# Altium footprint library Package_DFN_QFN.PcbLib: 735 footprints (part 23 of 46)
Each footprint in its own frame and in the unit in brackets; x right, y up, seen from the top. Pads: shape width x height; smd on the part's side, far side on the other; paste and mask are expansions set on the pad; w line width, h text height; cw(c..) or ccw(c..) is an arc to the next point about the centre after c.
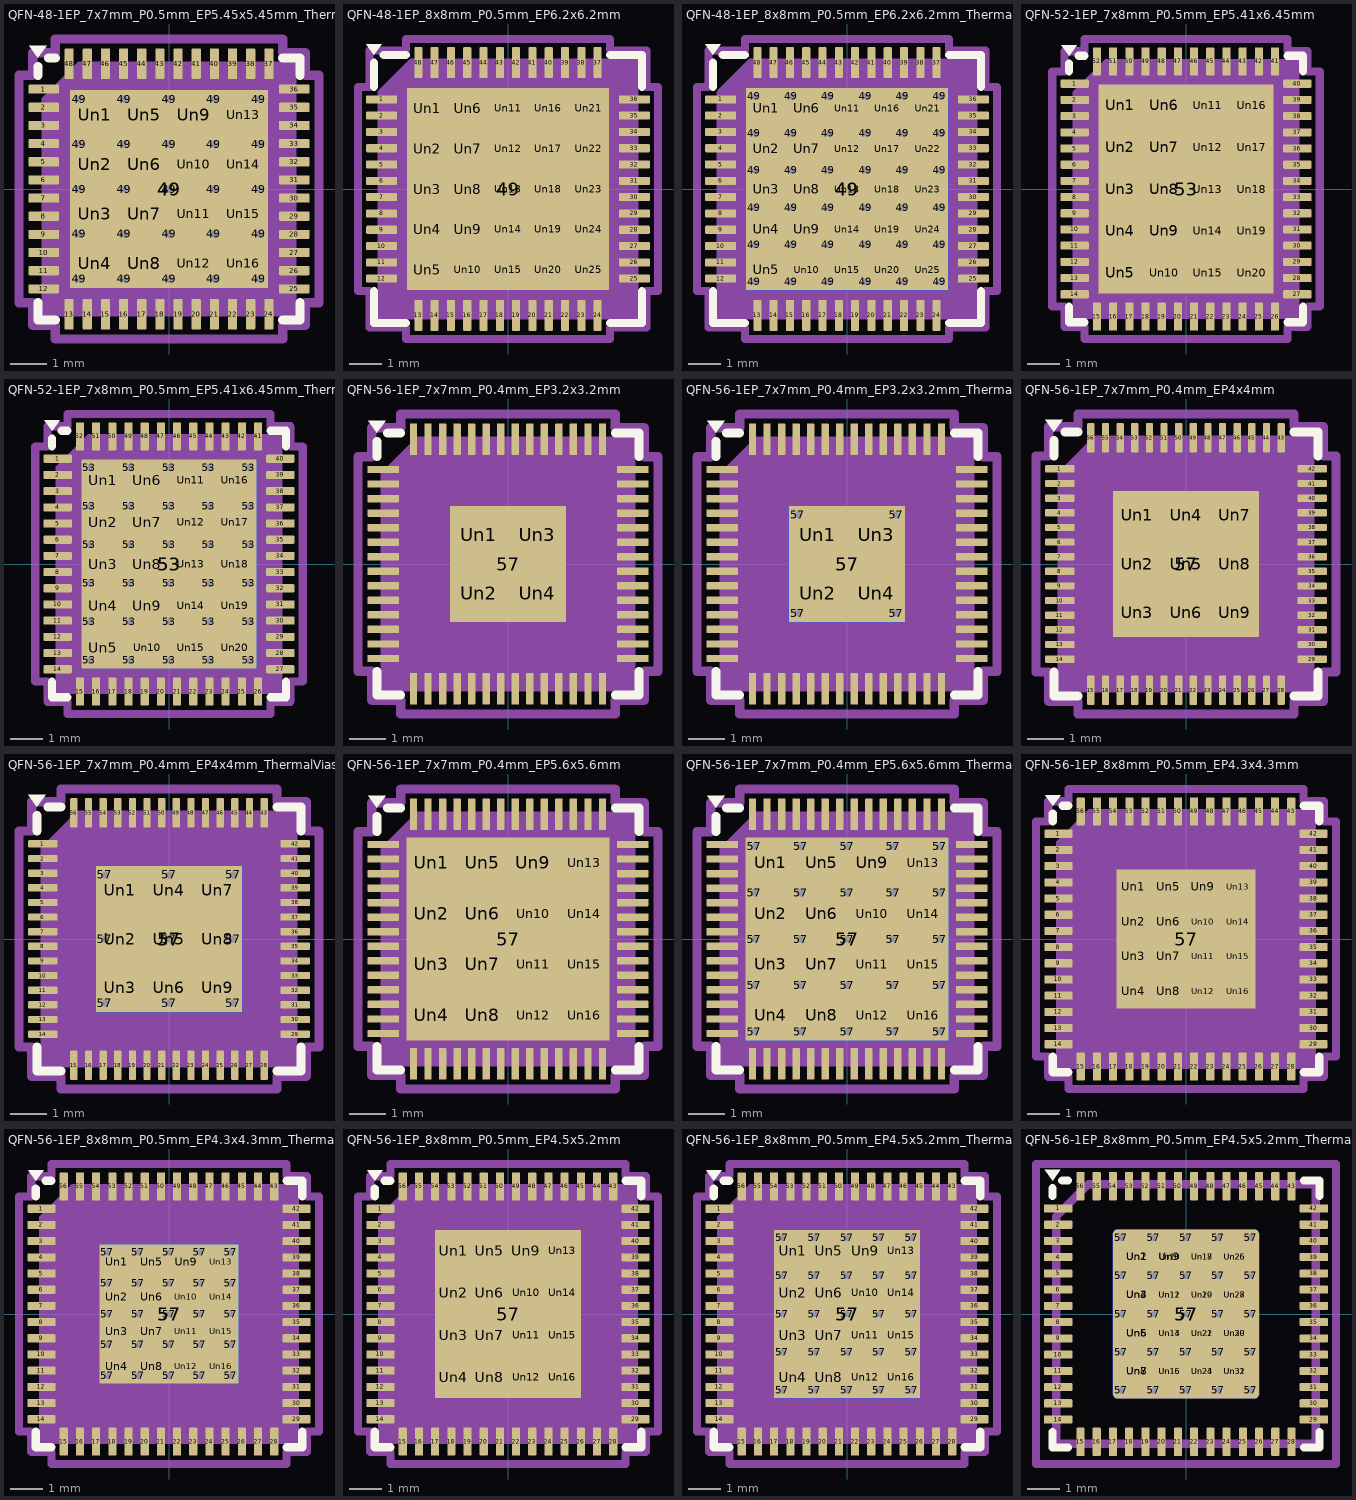
[diagram p22: the footprints below, top view; thin cyan lines are the x and y axes]

## QFN-48-1EP_7x7mm_P0.5mm_EP5.45x5.45mm_ThermalVias [mm] "QFN-48-1EP_7x7mm_P0.5mm_EP5.45x5.45mm_ThermalVias"
pads (91):
  rrect25% 0.85x0.25 smd: 1(-3.45,2.75) 2(-3.45,2.25) 3(-3.45,1.75) 4(-3.45,1.25) 5(-3.45,0.75) 6(-3.45,0.25) 7(-3.45,-0.25) 8(-3.45,-0.75) 9(-3.45,-1.25) 10(-3.45,-1.75) 11(-3.45,-2.25) 12(-3.45,-2.75) 25(3.45,-2.75) 26(3.45,-2.25) 27(3.45,-1.75) 28(3.45,-1.25) 29(3.45,-0.75) 30(3.45,-0.25) 31(3.45,0.25) 32(3.45,0.75) 33(3.45,1.25) 34(3.45,1.75) 35(3.45,2.25) 36(3.45,2.75)
  rrect25% 0.25x0.85 smd: 13(-2.75,-3.45) 14(-2.25,-3.45) 15(-1.75,-3.45) 16(-1.25,-3.45) 17(-0.75,-3.45) 18(-0.25,-3.45) 19(0.25,-3.45) 20(0.75,-3.45) 21(1.25,-3.45) 22(1.75,-3.45) 23(2.25,-3.45) 24(2.75,-3.45) 37(2.75,3.45) 38(2.25,3.45) 39(1.75,3.45) 40(1.25,3.45) 41(0.75,3.45) 42(0.25,3.45) 43(-0.25,3.45) 44(-0.75,3.45) 45(-1.25,3.45) 46(-1.75,3.45) 47(-2.25,3.45) 48(-2.75,3.45)
  round 0.5 hole 0.2: 49(-2.475,-2.475) 49(-2.475,-1.238) 49(-2.475,0) 49(-2.475,1.238) 49(-2.475,2.475) 49(-1.238,-2.475) 49(-1.238,-1.238) 49(-1.238,0) 49(-1.238,1.238) 49(-1.238,2.475) 49(0,-2.475) 49(0,-1.238) 49(0,0) 49(0,1.238) 49(0,2.475) 49(1.238,-2.475) 49(1.238,-1.238) 49(1.238,0) 49(1.238,1.238) 49(1.238,2.475) 49(2.475,-2.475) 49(2.475,-1.238) 49(2.475,0) 49(2.475,1.238) 49(2.475,2.475)
  rect 5.45x5.45 smd: 49(0,0)
  rect 5.45x5.45 smd far side: 49(0,0)
  rrect23% 1.1x1.1 on Top Paste: Un1(-2.04,2.04) Un2(-2.04,0.68) Un3(-2.04,-0.68) Un4(-2.04,-2.04) Un5(-0.68,2.04) Un6(-0.68,0.68) Un7(-0.68,-0.68) Un8(-0.68,-2.04) Un9(0.68,2.04) Un10(0.68,0.68) Un11(0.68,-0.68) Un12(0.68,-2.04) Un13(2.04,2.04) Un14(2.04,0.68) Un15(2.04,-0.68) Un16(2.04,-2.04)
F.SilkS:
  region: -3.61,3.61 -3.85,3.94 -3.37,3.94
  lines w0.254: -3.61,-3.135 -3.61,-3.61 -3.135,-3.61 ; -3.61,3.135 -3.61,3.37 ; -3.31,3.61 -3.135,3.61 ; 3.135,-3.61 3.61,-3.61 3.61,-3.135 ; 3.135,3.61 3.61,3.61 3.61,3.135
Top Component Center:
  lines w0.127: -0.127,0 0.127,0 -0.127,0 ; 0,-0.127 0,0.127 0,-0.127
Top Assembly:
  region: 3.5,-3.5 -3.5,-3.5 -3.5,2.5 -2.5,3.5 3.5,3.5
Top Courtyard:
  lines w0.254: -4.13,-3.13 -4.13,3.13 -3.75,3.13 -3.75,3.75 -3.13,3.75 -3.13,4.13 3.13,4.13 3.13,3.75 3.75,3.75 3.75,3.13 4.13,3.13 4.13,-3.13 3.75,-3.13 3.75,-3.75 3.13,-3.75 3.13,-4.13 -3.13,-4.13 -3.13,-3.75 -3.75,-3.75 -3.75,-3.13 -4.13,-3.13
Top Designator:
  text ".Designator" at -3.43,-0.344 h1.52
3D body "QFN-48-1EP_7x7mm_P0.5mm_EP5.15x5.15mm.step": height 0.77, standoff 0, extent -3.5,-3.5 3.5,3.5

## QFN-48-1EP_8x8mm_P0.5mm_EP6.2x6.2mm [mm] "QFN-48-1EP_8x8mm_P0.5mm_EP6.2x6.2mm"
pads (74):
  rrect25% 0.95x0.25 smd: 1(-3.875,2.75) 2(-3.875,2.25) 3(-3.875,1.75) 4(-3.875,1.25) 5(-3.875,0.75) 6(-3.875,0.25) 7(-3.875,-0.25) 8(-3.875,-0.75) 9(-3.875,-1.25) 10(-3.875,-1.75) 11(-3.875,-2.25) 12(-3.875,-2.75) 25(3.875,-2.75) 26(3.875,-2.25) 27(3.875,-1.75) 28(3.875,-1.25) 29(3.875,-0.75) 30(3.875,-0.25) 31(3.875,0.25) 32(3.875,0.75) 33(3.875,1.25) 34(3.875,1.75) 35(3.875,2.25) 36(3.875,2.75)
  rrect25% 0.25x0.95 smd: 13(-2.75,-3.875) 14(-2.25,-3.875) 15(-1.75,-3.875) 16(-1.25,-3.875) 17(-0.75,-3.875) 18(-0.25,-3.875) 19(0.25,-3.875) 20(0.75,-3.875) 21(1.25,-3.875) 22(1.75,-3.875) 23(2.25,-3.875) 24(2.75,-3.875) 37(2.75,3.875) 38(2.25,3.875) 39(1.75,3.875) 40(1.25,3.875) 41(0.75,3.875) 42(0.25,3.875) 43(-0.25,3.875) 44(-0.75,3.875) 45(-1.25,3.875) 46(-1.75,3.875) 47(-2.25,3.875) 48(-2.75,3.875)
  rect 6.2x6.2 smd: 49(0,0)
  rrect25% 1x1 on Top Paste: Un1(-2.48,2.48) Un2(-2.48,1.24) Un3(-2.48,0) Un4(-2.48,-1.24) Un5(-2.48,-2.48) Un6(-1.24,2.48) Un7(-1.24,1.24) Un8(-1.24,0) Un9(-1.24,-1.24) Un10(-1.24,-2.48) Un11(0,2.48) Un12(0,1.24) Un13(0,0) Un14(0,-1.24) Un15(0,-2.48) Un16(1.24,2.48) Un17(1.24,1.24) Un18(1.24,0) Un19(1.24,-1.24) Un20(1.24,-2.48) Un21(2.48,2.48) Un22(2.48,1.24) Un23(2.48,0) Un24(2.48,-1.24) Un25(2.48,-2.48)
F.SilkS:
  region: -4.11,4.11 -4.35,4.44 -3.87,4.44
  lines w0.254: -4.11,-3.135 -4.11,-4.11 -3.135,-4.11 ; -4.11,3.135 -4.11,3.87 ; -3.81,4.11 -3.135,4.11 ; 3.135,-4.11 4.11,-4.11 4.11,-3.135 ; 3.135,4.11 4.11,4.11 4.11,3.135
Top Component Center:
  lines w0.127: -0.127,0 0.127,0 -0.127,0 ; 0,-0.127 0,0.127 0,-0.127
Top Assembly:
  region: 4,-4 -4,-4 -4,3 -3,4 4,4
Top Courtyard:
  lines w0.254: -4.6,-3.13 -4.6,3.13 -4.25,3.13 -4.25,4.25 -3.13,4.25 -3.13,4.6 3.13,4.6 3.13,4.25 4.25,4.25 4.25,3.13 4.6,3.13 4.6,-3.13 4.25,-3.13 4.25,-4.25 3.13,-4.25 3.13,-4.6 -3.13,-4.6 -3.13,-4.25 -4.25,-4.25 -4.25,-3.13 -4.6,-3.13
Top Designator:
  text ".Designator" at -3.43,-0.344 h1.52

## QFN-48-1EP_8x8mm_P0.5mm_EP6.2x6.2mm_ThermalVias [mm] "QFN-48-1EP_8x8mm_P0.5mm_EP6.2x6.2mm_ThermalVias"
pads (111):
  rrect25% 0.95x0.25 smd: 1(-3.875,2.75) 2(-3.875,2.25) 3(-3.875,1.75) 4(-3.875,1.25) 5(-3.875,0.75) 6(-3.875,0.25) 7(-3.875,-0.25) 8(-3.875,-0.75) 9(-3.875,-1.25) 10(-3.875,-1.75) 11(-3.875,-2.25) 12(-3.875,-2.75) 25(3.875,-2.75) 26(3.875,-2.25) 27(3.875,-1.75) 28(3.875,-1.25) 29(3.875,-0.75) 30(3.875,-0.25) 31(3.875,0.25) 32(3.875,0.75) 33(3.875,1.25) 34(3.875,1.75) 35(3.875,2.25) 36(3.875,2.75)
  rrect25% 0.25x0.95 smd: 13(-2.75,-3.875) 14(-2.25,-3.875) 15(-1.75,-3.875) 16(-1.25,-3.875) 17(-0.75,-3.875) 18(-0.25,-3.875) 19(0.25,-3.875) 20(0.75,-3.875) 21(1.25,-3.875) 22(1.75,-3.875) 23(2.25,-3.875) 24(2.75,-3.875) 37(2.75,3.875) 38(2.25,3.875) 39(1.75,3.875) 40(1.25,3.875) 41(0.75,3.875) 42(0.25,3.875) 43(-0.25,3.875) 44(-0.75,3.875) 45(-1.25,3.875) 46(-1.75,3.875) 47(-2.25,3.875) 48(-2.75,3.875)
  round 0.5 hole 0.2: 49(-2.85,-2.85) 49(-2.85,-1.71) 49(-2.85,-0.57) 49(-2.85,0.57) 49(-2.85,1.71) 49(-2.85,2.85) 49(-1.71,-2.85) 49(-1.71,-1.71) 49(-1.71,-0.57) 49(-1.71,0.57) 49(-1.71,1.71) 49(-1.71,2.85) 49(-0.57,-2.85) 49(-0.57,-1.71) 49(-0.57,-0.57) 49(-0.57,0.57) 49(-0.57,1.71) 49(-0.57,2.85) 49(0.57,-2.85) 49(0.57,-1.71) 49(0.57,-0.57) 49(0.57,0.57) 49(0.57,1.71) 49(0.57,2.85) 49(1.71,-2.85) 49(1.71,-1.71) 49(1.71,-0.57) 49(1.71,0.57) 49(1.71,1.71) 49(1.71,2.85) 49(2.85,-2.85) 49(2.85,-1.71) 49(2.85,-0.57) 49(2.85,0.57) 49(2.85,1.71) 49(2.85,2.85)
  rect 6.2x6.2 smd: 49(0,0)
  rect 6.2x6.2 smd far side: 49(0,0)
  rrect25% 0.96x0.96 on Top Paste: Un1(-2.48,2.48) Un2(-2.48,1.24) Un3(-2.48,0) Un4(-2.48,-1.24) Un5(-2.48,-2.48) Un6(-1.24,2.48) Un7(-1.24,1.24) Un8(-1.24,0) Un9(-1.24,-1.24) Un10(-1.24,-2.48) Un11(0,2.48) Un12(0,1.24) Un13(0,0) Un14(0,-1.24) Un15(0,-2.48) Un16(1.24,2.48) Un17(1.24,1.24) Un18(1.24,0) Un19(1.24,-1.24) Un20(1.24,-2.48) Un21(2.48,2.48) Un22(2.48,1.24) Un23(2.48,0) Un24(2.48,-1.24) Un25(2.48,-2.48)
F.SilkS:
  region: -4.11,4.11 -4.35,4.44 -3.87,4.44
  lines w0.254: -4.11,-3.135 -4.11,-4.11 -3.135,-4.11 ; -4.11,3.135 -4.11,3.87 ; -3.81,4.11 -3.135,4.11 ; 3.135,-4.11 4.11,-4.11 4.11,-3.135 ; 3.135,4.11 4.11,4.11 4.11,3.135
Top Component Center:
  lines w0.127: -0.127,0 0.127,0 -0.127,0 ; 0,-0.127 0,0.127 0,-0.127
Top Assembly:
  region: 4,-4 -4,-4 -4,3 -3,4 4,4
Top Courtyard:
  lines w0.254: -4.6,-3.13 -4.25,-3.13 -4.25,-4.25 -3.13,-4.25 -3.13,-4.6 3.13,-4.6 3.13,-4.25 4.25,-4.25 4.25,-3.13 4.6,-3.13 4.6,3.13 4.25,3.13 4.25,4.25 3.13,4.25 3.13,4.6 -3.13,4.6 -3.13,4.25 -4.25,4.25 -4.25,3.13 -4.6,3.13 -4.6,-3.13
Top Designator:
  text ".Designator" at -3.43,-0.344 h1.52

## QFN-52-1EP_7x8mm_P0.5mm_EP5.41x6.45mm [mm] "QFN-52-1EP_7x8mm_P0.5mm_EP5.41x6.45mm"
pads (73):
  rrect25% 0.875x0.25 smd: 1(-3.437,3.25) 2(-3.437,2.75) 3(-3.437,2.25) 4(-3.437,1.75) 5(-3.437,1.25) 6(-3.437,0.75) 7(-3.437,0.25) 8(-3.437,-0.25) 9(-3.437,-0.75) 10(-3.437,-1.25) 11(-3.437,-1.75) 12(-3.437,-2.25) 13(-3.437,-2.75) 14(-3.437,-3.25) 27(3.437,-3.25) 28(3.437,-2.75) 29(3.437,-2.25) 30(3.437,-1.75) 31(3.437,-1.25) 32(3.437,-0.75) 33(3.437,-0.25) 34(3.437,0.25) 35(3.437,0.75) 36(3.437,1.25) 37(3.437,1.75) 38(3.437,2.25) 39(3.437,2.75) 40(3.437,3.25)
  rrect25% 0.25x0.875 smd: 15(-2.75,-3.938) 16(-2.25,-3.938) 17(-1.75,-3.938) 18(-1.25,-3.938) 19(-0.75,-3.938) 20(-0.25,-3.938) 21(0.25,-3.938) 22(0.75,-3.938) 23(1.25,-3.938) 24(1.75,-3.938) 25(2.25,-3.938) 26(2.75,-3.938) 41(2.75,3.938) 42(2.25,3.938) 43(1.75,3.938) 44(1.25,3.938) 45(0.75,3.938) 46(0.25,3.938) 47(-0.25,3.938) 48(-0.75,3.938) 49(-1.25,3.938) 50(-1.75,3.938) 51(-2.25,3.938) 52(-2.75,3.938)
  rect 5.41x6.45 smd: 53(0,0)
  rrect24% 1.09x1.04 on Top Paste: Un1(-2.025,2.58) Un2(-2.025,1.29) Un3(-2.025,0) Un4(-2.025,-1.29) Un5(-2.025,-2.58) Un6(-0.675,2.58) Un7(-0.675,1.29) Un8(-0.675,0) Un9(-0.675,-1.29) Un10(-0.675,-2.58) Un11(0.675,2.58) Un12(0.675,1.29) Un13(0.675,0) Un14(0.675,-1.29) Un15(0.675,-2.58) Un16(2.025,2.58) Un17(2.025,1.29) Un18(2.025,0) Un19(2.025,-1.29) Un20(2.025,-2.58)
F.SilkS:
  region: -3.61,4.11 -3.85,4.44 -3.37,4.44
  lines w0.254: -3.61,-3.635 -3.61,-4.11 -3.135,-4.11 ; -3.61,3.635 -3.61,3.87 ; -3.31,4.11 -3.135,4.11 ; 3.135,-4.11 3.61,-4.11 3.61,-3.635 ; 3.135,4.11 3.61,4.11 3.61,3.635
Top Component Center:
  lines w0.127: -0.127,0 0.127,0 -0.127,0 ; 0,-0.127 0,0.127 0,-0.127
Top Assembly:
  region: 3.5,-4 -3.5,-4 -3.5,3 -2.5,4 3.5,4
Top Courtyard:
  lines w0.254: -4.13,-3.63 -3.75,-3.63 -3.75,-4.25 -3.13,-4.25 -3.13,-4.63 3.13,-4.63 3.13,-4.25 3.75,-4.25 3.75,-3.63 4.13,-3.63 4.13,3.63 3.75,3.63 3.75,4.25 3.13,4.25 3.13,4.63 -3.13,4.63 -3.13,4.25 -3.75,4.25 -3.75,3.63 -4.13,3.63 -4.13,-3.63
Top Designator:
  text ".Designator" at -3.43,-0.344 h1.52
3D body "QFN-52-1EP_7x8mm_P0.5mm_EP5.41x6.45mm.step": height 0.77, standoff 0, extent -3.5,-4 3.5,4

## QFN-52-1EP_7x8mm_P0.5mm_EP5.41x6.45mm_ThermalVias [mm] "QFN-52-1EP_7x8mm_P0.5mm_EP5.41x6.45mm_ThermalVias"
pads (104):
  rrect25% 0.875x0.25 smd: 1(-3.437,3.25) 2(-3.437,2.75) 3(-3.437,2.25) 4(-3.437,1.75) 5(-3.437,1.25) 6(-3.437,0.75) 7(-3.437,0.25) 8(-3.437,-0.25) 9(-3.437,-0.75) 10(-3.437,-1.25) 11(-3.437,-1.75) 12(-3.437,-2.25) 13(-3.437,-2.75) 14(-3.437,-3.25) 27(3.437,-3.25) 28(3.437,-2.75) 29(3.437,-2.25) 30(3.437,-1.75) 31(3.437,-1.25) 32(3.437,-0.75) 33(3.437,-0.25) 34(3.437,0.25) 35(3.437,0.75) 36(3.437,1.25) 37(3.437,1.75) 38(3.437,2.25) 39(3.437,2.75) 40(3.437,3.25)
  rrect25% 0.25x0.875 smd: 15(-2.75,-3.938) 16(-2.25,-3.938) 17(-1.75,-3.938) 18(-1.25,-3.938) 19(-0.75,-3.938) 20(-0.25,-3.938) 21(0.25,-3.938) 22(0.75,-3.938) 23(1.25,-3.938) 24(1.75,-3.938) 25(2.25,-3.938) 26(2.75,-3.938) 41(2.75,3.938) 42(2.25,3.938) 43(1.75,3.938) 44(1.25,3.938) 45(0.75,3.938) 46(0.25,3.938) 47(-0.25,3.938) 48(-0.75,3.938) 49(-1.25,3.938) 50(-1.75,3.938) 51(-2.25,3.938) 52(-2.75,3.938)
  round 0.5 hole 0.2: 53(-2.455,-2.975) 53(-2.455,-1.785) 53(-2.455,-0.595) 53(-2.455,0.595) 53(-2.455,1.785) 53(-2.455,2.975) 53(-1.228,-2.975) 53(-1.228,-1.785) 53(-1.228,-0.595) 53(-1.228,0.595) 53(-1.228,1.785) 53(-1.228,2.975) 53(0,-2.975) 53(0,-1.785) 53(0,-0.595) 53(0,0.595) 53(0,1.785) 53(0,2.975) 53(1.228,-2.975) 53(1.228,-1.785) 53(1.228,-0.595) 53(1.228,0.595) 53(1.228,1.785) 53(1.228,2.975) 53(2.455,-2.975) 53(2.455,-1.785) 53(2.455,-0.595) 53(2.455,0.595) 53(2.455,1.785) 53(2.455,2.975)
  rect 5.41x6.45 smd: 53(0,0)
  rect 5.41x6.45 smd far side: 53(0,0)
  rrect25% 1.05x1 on Top Paste: Un1(-2.025,2.58) Un2(-2.025,1.29) Un3(-2.025,0) Un4(-2.025,-1.29) Un5(-2.025,-2.58) Un6(-0.675,2.58) Un7(-0.675,1.29) Un8(-0.675,0) Un9(-0.675,-1.29) Un10(-0.675,-2.58) Un11(0.675,2.58) Un12(0.675,1.29) Un13(0.675,0) Un14(0.675,-1.29) Un15(0.675,-2.58) Un16(2.025,2.58) Un17(2.025,1.29) Un18(2.025,0) Un19(2.025,-1.29) Un20(2.025,-2.58)
F.SilkS:
  region: -3.61,4.11 -3.85,4.44 -3.37,4.44
  lines w0.254: -3.61,-3.635 -3.61,-4.11 -3.135,-4.11 ; -3.61,3.635 -3.61,3.87 ; -3.31,4.11 -3.135,4.11 ; 3.135,-4.11 3.61,-4.11 3.61,-3.635 ; 3.135,4.11 3.61,4.11 3.61,3.635
Top Component Center:
  lines w0.127: -0.127,0 0.127,0 -0.127,0 ; 0,-0.127 0,0.127 0,-0.127
Top Assembly:
  region: 3.5,-4 -3.5,-4 -3.5,3 -2.5,4 3.5,4
Top Courtyard:
  lines w0.254: -4.13,-3.63 -3.75,-3.63 -3.75,-4.25 -3.13,-4.25 -3.13,-4.63 3.13,-4.63 3.13,-4.25 3.75,-4.25 3.75,-3.63 4.13,-3.63 4.13,3.63 3.75,3.63 3.75,4.25 3.13,4.25 3.13,4.63 -3.13,4.63 -3.13,4.25 -3.75,4.25 -3.75,3.63 -4.13,3.63 -4.13,-3.63
Top Designator:
  text ".Designator" at -3.43,-0.344 h1.52
3D body "QFN-52-1EP_7x8mm_P0.5mm_EP5.41x6.45mm.step": height 0.77, standoff 0, extent -3.5,-4 3.5,4

## QFN-56-1EP_7x7mm_P0.4mm_EP3.2x3.2mm [mm] "QFN-56-1EP_7x7mm_P0.4mm_EP3.2x3.2mm"
pads (61):
  rrect25% 0.875x0.2 smd: 1(-3.437,2.6) 2(-3.437,2.2) 3(-3.437,1.8) 4(-3.437,1.4) 5(-3.437,1) 6(-3.437,0.6) 7(-3.437,0.2) 8(-3.437,-0.2) 9(-3.437,-0.6) 10(-3.437,-1) 11(-3.437,-1.4) 12(-3.437,-1.8) 13(-3.437,-2.2) 14(-3.437,-2.6) 29(3.437,-2.6) 30(3.437,-2.2) 31(3.437,-1.8) 32(3.437,-1.4) 33(3.437,-1) 34(3.437,-0.6) 35(3.437,-0.2) 36(3.437,0.2) 37(3.437,0.6) 38(3.437,1) 39(3.437,1.4) 40(3.437,1.8) 41(3.437,2.2) 42(3.437,2.6)
  rrect25% 0.2x0.875 smd: 15(-2.6,-3.437) 16(-2.2,-3.437) 17(-1.8,-3.437) 18(-1.4,-3.437) 19(-1,-3.437) 20(-0.6,-3.437) 21(-0.2,-3.437) 22(0.2,-3.437) 23(0.6,-3.437) 24(1,-3.437) 25(1.4,-3.437) 26(1.8,-3.437) 27(2.2,-3.437) 28(2.6,-3.437) 43(2.6,3.437) 44(2.2,3.437) 45(1.8,3.437) 46(1.4,3.437) 47(1,3.437) 48(0.6,3.437) 49(0.2,3.437) 50(-0.2,3.437) 51(-0.6,3.437) 52(-1,3.437) 53(-1.4,3.437) 54(-1.8,3.437) 55(-2.2,3.437) 56(-2.6,3.437)
  rect 3.2x3.2 smd: 57(0,0)
  rrect19% 1.29x1.29 on Top Paste: Un1(-0.8,0.8) Un2(-0.8,-0.8) Un3(0.8,0.8) Un4(0.8,-0.8)
F.SilkS:
  region: -3.61,3.61 -3.85,3.94 -3.37,3.94
  lines w0.254: -3.61,-2.96 -3.61,-3.61 -2.96,-3.61 ; -3.61,2.96 -3.61,3.37 ; -3.31,3.61 -2.96,3.61 ; 2.96,-3.61 3.61,-3.61 3.61,-2.96 ; 2.96,3.61 3.61,3.61 3.61,2.96
Top Component Center:
  lines w0.127: -0.127,0 0.127,0 -0.127,0 ; 0,-0.127 0,0.127 0,-0.127
Top Assembly:
  region: 3.5,-3.5 -3.5,-3.5 -3.5,2.5 -2.5,3.5 3.5,3.5
Top Courtyard:
  lines w0.254: -4.13,-2.95 -3.75,-2.95 -3.75,-3.75 -2.95,-3.75 -2.95,-4.13 2.95,-4.13 2.95,-3.75 3.75,-3.75 3.75,-2.95 4.13,-2.95 4.13,2.95 3.75,2.95 3.75,3.75 2.95,3.75 2.95,4.13 -2.95,4.13 -2.95,3.75 -3.75,3.75 -3.75,2.95 -4.13,2.95 -4.13,-2.95
Top Designator:
  text ".Designator" at -3.43,-0.344 h1.52
3D body "QFN-56-1EP_7x7mm_P0.4mm_EP3.2x3.2mm.step": height 0.9, standoff 0, extent -3.5,-3.5 3.5,3.5

## QFN-56-1EP_7x7mm_P0.4mm_EP3.2x3.2mm_ThermalVias [mm] "QFN-56-1EP_7x7mm_P0.4mm_EP3.2x3.2mm_ThermalVias"
pads (66):
  rrect25% 0.875x0.2 smd: 1(-3.437,2.6) 2(-3.437,2.2) 3(-3.437,1.8) 4(-3.437,1.4) 5(-3.437,1) 6(-3.437,0.6) 7(-3.437,0.2) 8(-3.437,-0.2) 9(-3.437,-0.6) 10(-3.437,-1) 11(-3.437,-1.4) 12(-3.437,-1.8) 13(-3.437,-2.2) 14(-3.437,-2.6) 29(3.437,-2.6) 30(3.437,-2.2) 31(3.437,-1.8) 32(3.437,-1.4) 33(3.437,-1) 34(3.437,-0.6) 35(3.437,-0.2) 36(3.437,0.2) 37(3.437,0.6) 38(3.437,1) 39(3.437,1.4) 40(3.437,1.8) 41(3.437,2.2) 42(3.437,2.6)
  rrect25% 0.2x0.875 smd: 15(-2.6,-3.437) 16(-2.2,-3.437) 17(-1.8,-3.437) 18(-1.4,-3.437) 19(-1,-3.437) 20(-0.6,-3.437) 21(-0.2,-3.437) 22(0.2,-3.437) 23(0.6,-3.437) 24(1,-3.437) 25(1.4,-3.437) 26(1.8,-3.437) 27(2.2,-3.437) 28(2.6,-3.437) 43(2.6,3.437) 44(2.2,3.437) 45(1.8,3.437) 46(1.4,3.437) 47(1,3.437) 48(0.6,3.437) 49(0.2,3.437) 50(-0.2,3.437) 51(-0.6,3.437) 52(-1,3.437) 53(-1.4,3.437) 54(-1.8,3.437) 55(-2.2,3.437) 56(-2.6,3.437)
  round 0.5 hole 0.2: 57(-1.35,-1.35) 57(-1.35,1.35) 57(1.35,-1.35) 57(1.35,1.35)
  rect 3.2x3.2 smd: 57(0,0)
  rect 3.2x3.2 smd far side: 57(0,0)
  rrect20% 1.24x1.24 on Top Paste: Un1(-0.8,0.8) Un2(-0.8,-0.8) Un3(0.8,0.8) Un4(0.8,-0.8)
F.SilkS:
  region: -3.61,3.61 -3.85,3.94 -3.37,3.94
  lines w0.254: -3.61,-2.96 -3.61,-3.61 -2.96,-3.61 ; -3.61,2.96 -3.61,3.37 ; -3.31,3.61 -2.96,3.61 ; 2.96,-3.61 3.61,-3.61 3.61,-2.96 ; 2.96,3.61 3.61,3.61 3.61,2.96
Top Component Center:
  lines w0.127: -0.127,0 0.127,0 -0.127,0 ; 0,-0.127 0,0.127 0,-0.127
Top Assembly:
  region: 3.5,-3.5 -3.5,-3.5 -3.5,2.5 -2.5,3.5 3.5,3.5
Top Courtyard:
  lines w0.254: -4.13,-2.95 -3.75,-2.95 -3.75,-3.75 -2.95,-3.75 -2.95,-4.13 2.95,-4.13 2.95,-3.75 3.75,-3.75 3.75,-2.95 4.13,-2.95 4.13,2.95 3.75,2.95 3.75,3.75 2.95,3.75 2.95,4.13 -2.95,4.13 -2.95,3.75 -3.75,3.75 -3.75,2.95 -4.13,2.95 -4.13,-2.95
Top Designator:
  text ".Designator" at -3.43,-0.344 h1.52
3D body "QFN-56-1EP_7x7mm_P0.4mm_EP3.2x3.2mm.step": height 0.9, standoff 0, extent -3.5,-3.5 3.5,3.5

## QFN-56-1EP_7x7mm_P0.4mm_EP4x4mm [mm] "QFN-56-1EP_7x7mm_P0.4mm_EP4x4mm"
pads (66):
  rrect25% 0.8x0.2 smd: 1(-3.45,2.6) 2(-3.45,2.2) 3(-3.45,1.8) 4(-3.45,1.4) 5(-3.45,1) 6(-3.45,0.6) 7(-3.45,0.2) 8(-3.45,-0.2) 9(-3.45,-0.6) 10(-3.45,-1) 11(-3.45,-1.4) 12(-3.45,-1.8) 13(-3.45,-2.2) 14(-3.45,-2.6) 29(3.45,-2.6) 30(3.45,-2.2) 31(3.45,-1.8) 32(3.45,-1.4) 33(3.45,-1) 34(3.45,-0.6) 35(3.45,-0.2) 36(3.45,0.2) 37(3.45,0.6) 38(3.45,1) 39(3.45,1.4) 40(3.45,1.8) 41(3.45,2.2) 42(3.45,2.6)
  rrect25% 0.2x0.8 smd: 15(-2.6,-3.45) 16(-2.2,-3.45) 17(-1.8,-3.45) 18(-1.4,-3.45) 19(-1,-3.45) 20(-0.6,-3.45) 21(-0.2,-3.45) 22(0.2,-3.45) 23(0.6,-3.45) 24(1,-3.45) 25(1.4,-3.45) 26(1.8,-3.45) 27(2.2,-3.45) 28(2.6,-3.45) 43(2.6,3.45) 44(2.2,3.45) 45(1.8,3.45) 46(1.4,3.45) 47(1,3.45) 48(0.6,3.45) 49(0.2,3.45) 50(-0.2,3.45) 51(-0.6,3.45) 52(-1,3.45) 53(-1.4,3.45) 54(-1.8,3.45) 55(-2.2,3.45) 56(-2.6,3.45)
  rect 4x4 smd: 57(0,0)
  rrect23% 1.07x1.07 on Top Paste: Un1(-1.33,1.33) Un2(-1.33,0) Un3(-1.33,-1.33) Un4(0,1.33) Un5(0,0) Un6(0,-1.33) Un7(1.33,1.33) Un8(1.33,0) Un9(1.33,-1.33)
F.SilkS:
  region: -3.61,3.61 -3.85,3.94 -3.37,3.94
  lines w0.254: -3.61,-2.96 -3.61,-3.61 -2.96,-3.61 ; -3.61,2.96 -3.61,3.37 ; -3.31,3.61 -2.96,3.61 ; 2.96,-3.61 3.61,-3.61 3.61,-2.96 ; 2.96,3.61 3.61,3.61 3.61,2.96
Top Component Center:
  lines w0.127: -0.127,0 0.127,0 -0.127,0 ; 0,-0.127 0,0.127 0,-0.127
Top Assembly:
  region: 3.5,-3.5 -3.5,-3.5 -3.5,2.5 -2.5,3.5 3.5,3.5
Top Courtyard:
  lines w0.254: -4.1,-2.95 -3.75,-2.95 -3.75,-3.75 -2.95,-3.75 -2.95,-4.1 2.95,-4.1 2.95,-3.75 3.75,-3.75 3.75,-2.95 4.1,-2.95 4.1,2.95 3.75,2.95 3.75,3.75 2.95,3.75 2.95,4.1 -2.95,4.1 -2.95,3.75 -3.75,3.75 -3.75,2.95 -4.1,2.95 -4.1,-2.95
Top Designator:
  text ".Designator" at -3.43,-0.344 h1.52
3D body "QFN-56-1EP_7x7mm_P0.4mm_EP4x4mm.step": height 0.88, standoff 0, extent -3.5,-3.5 3.5,3.5

## QFN-56-1EP_7x7mm_P0.4mm_EP4x4mm_ThermalVias [mm] "QFN-56-1EP_7x7mm_P0.4mm_EP4x4mm_ThermalVias"
pads (76):
  rrect25% 0.8x0.2 smd: 1(-3.45,2.6) 2(-3.45,2.2) 3(-3.45,1.8) 4(-3.45,1.4) 5(-3.45,1) 6(-3.45,0.6) 7(-3.45,0.2) 8(-3.45,-0.2) 9(-3.45,-0.6) 10(-3.45,-1) 11(-3.45,-1.4) 12(-3.45,-1.8) 13(-3.45,-2.2) 14(-3.45,-2.6) 29(3.45,-2.6) 30(3.45,-2.2) 31(3.45,-1.8) 32(3.45,-1.4) 33(3.45,-1) 34(3.45,-0.6) 35(3.45,-0.2) 36(3.45,0.2) 37(3.45,0.6) 38(3.45,1) 39(3.45,1.4) 40(3.45,1.8) 41(3.45,2.2) 42(3.45,2.6)
  rrect25% 0.2x0.8 smd: 15(-2.6,-3.45) 16(-2.2,-3.45) 17(-1.8,-3.45) 18(-1.4,-3.45) 19(-1,-3.45) 20(-0.6,-3.45) 21(-0.2,-3.45) 22(0.2,-3.45) 23(0.6,-3.45) 24(1,-3.45) 25(1.4,-3.45) 26(1.8,-3.45) 27(2.2,-3.45) 28(2.6,-3.45) 43(2.6,3.45) 44(2.2,3.45) 45(1.8,3.45) 46(1.4,3.45) 47(1,3.45) 48(0.6,3.45) 49(0.2,3.45) 50(-0.2,3.45) 51(-0.6,3.45) 52(-1,3.45) 53(-1.4,3.45) 54(-1.8,3.45) 55(-2.2,3.45) 56(-2.6,3.45)
  round 0.5 hole 0.2: 57(-1.75,-1.75) 57(-1.75,0) 57(-1.75,1.75) 57(0,-1.75) 57(0,0) 57(0,1.75) 57(1.75,-1.75) 57(1.75,0) 57(1.75,1.75)
  rect 4x4 smd: 57(0,0)
  rect 4x4 smd far side: 57(0,0)
  rrect24% 1.03x1.03 on Top Paste: Un1(-1.33,1.33) Un2(-1.33,0) Un3(-1.33,-1.33) Un4(0,1.33) Un5(0,0) Un6(0,-1.33) Un7(1.33,1.33) Un8(1.33,0) Un9(1.33,-1.33)
F.SilkS:
  region: -3.61,3.61 -3.85,3.94 -3.37,3.94
  lines w0.254: -3.61,-2.96 -3.61,-3.61 -2.96,-3.61 ; -3.61,2.96 -3.61,3.37 ; -3.31,3.61 -2.96,3.61 ; 2.96,-3.61 3.61,-3.61 3.61,-2.96 ; 2.96,3.61 3.61,3.61 3.61,2.96
Top Component Center:
  lines w0.127: -0.127,0 0.127,0 -0.127,0 ; 0,-0.127 0,0.127 0,-0.127
Top Assembly:
  region: 3.5,-3.5 -3.5,-3.5 -3.5,2.5 -2.5,3.5 3.5,3.5
Top Courtyard:
  lines w0.254: -4.1,-2.95 -3.75,-2.95 -3.75,-3.75 -2.95,-3.75 -2.95,-4.1 2.95,-4.1 2.95,-3.75 3.75,-3.75 3.75,-2.95 4.1,-2.95 4.1,2.95 3.75,2.95 3.75,3.75 2.95,3.75 2.95,4.1 -2.95,4.1 -2.95,3.75 -3.75,3.75 -3.75,2.95 -4.1,2.95 -4.1,-2.95
Top Designator:
  text ".Designator" at -3.43,-0.344 h1.52
3D body "QFN-56-1EP_7x7mm_P0.4mm_EP4x4mm.step": height 0.88, standoff 0, extent -3.5,-3.5 3.5,3.5

## QFN-56-1EP_7x7mm_P0.4mm_EP5.6x5.6mm [mm] "QFN-56-1EP_7x7mm_P0.4mm_EP5.6x5.6mm"
pads (73):
  rrect25% 0.875x0.2 smd: 1(-3.437,2.6) 2(-3.437,2.2) 3(-3.437,1.8) 4(-3.437,1.4) 5(-3.437,1) 6(-3.437,0.6) 7(-3.437,0.2) 8(-3.437,-0.2) 9(-3.437,-0.6) 10(-3.437,-1) 11(-3.437,-1.4) 12(-3.437,-1.8) 13(-3.437,-2.2) 14(-3.437,-2.6) 29(3.437,-2.6) 30(3.437,-2.2) 31(3.437,-1.8) 32(3.437,-1.4) 33(3.437,-1) 34(3.437,-0.6) 35(3.437,-0.2) 36(3.437,0.2) 37(3.437,0.6) 38(3.437,1) 39(3.437,1.4) 40(3.437,1.8) 41(3.437,2.2) 42(3.437,2.6)
  rrect25% 0.2x0.875 smd: 15(-2.6,-3.437) 16(-2.2,-3.437) 17(-1.8,-3.437) 18(-1.4,-3.437) 19(-1,-3.437) 20(-0.6,-3.437) 21(-0.2,-3.437) 22(0.2,-3.437) 23(0.6,-3.437) 24(1,-3.437) 25(1.4,-3.437) 26(1.8,-3.437) 27(2.2,-3.437) 28(2.6,-3.437) 43(2.6,3.437) 44(2.2,3.437) 45(1.8,3.437) 46(1.4,3.437) 47(1,3.437) 48(0.6,3.437) 49(0.2,3.437) 50(-0.2,3.437) 51(-0.6,3.437) 52(-1,3.437) 53(-1.4,3.437) 54(-1.8,3.437) 55(-2.2,3.437) 56(-2.6,3.437)
  rect 5.6x5.6 smd: 57(0,0)
  rrect22% 1.13x1.13 on Top Paste: Un1(-2.1,2.1) Un2(-2.1,0.7) Un3(-2.1,-0.7) Un4(-2.1,-2.1) Un5(-0.7,2.1) Un6(-0.7,0.7) Un7(-0.7,-0.7) Un8(-0.7,-2.1) Un9(0.7,2.1) Un10(0.7,0.7) Un11(0.7,-0.7) Un12(0.7,-2.1) Un13(2.1,2.1) Un14(2.1,0.7) Un15(2.1,-0.7) Un16(2.1,-2.1)
F.SilkS:
  region: -3.61,3.61 -3.85,3.94 -3.37,3.94
  lines w0.254: -3.61,-2.96 -3.61,-3.61 -2.96,-3.61 ; -3.61,2.96 -3.61,3.37 ; -3.31,3.61 -2.96,3.61 ; 2.96,-3.61 3.61,-3.61 3.61,-2.96 ; 2.96,3.61 3.61,3.61 3.61,2.96
Top Component Center:
  lines w0.127: -0.127,0 0.127,0 -0.127,0 ; 0,-0.127 0,0.127 0,-0.127
Top Assembly:
  region: 3.5,-3.5 -3.5,-3.5 -3.5,2.5 -2.5,3.5 3.5,3.5
Top Courtyard:
  lines w0.254: -4.13,-2.95 -3.75,-2.95 -3.75,-3.75 -2.95,-3.75 -2.95,-4.13 2.95,-4.13 2.95,-3.75 3.75,-3.75 3.75,-2.95 4.13,-2.95 4.13,2.95 3.75,2.95 3.75,3.75 2.95,3.75 2.95,4.13 -2.95,4.13 -2.95,3.75 -3.75,3.75 -3.75,2.95 -4.13,2.95 -4.13,-2.95
Top Designator:
  text ".Designator" at -3.43,-0.344 h1.52
3D body "QFN-56-1EP_7x7mm_P0.4mm_EP5.6x5.6mm.step": height 0.92, standoff 0, extent -3.5,-3.5 3.5,3.5

## QFN-56-1EP_7x7mm_P0.4mm_EP5.6x5.6mm_ThermalVias [mm] "QFN-56-1EP_7x7mm_P0.4mm_EP5.6x5.6mm_ThermalVias"
pads (99):
  rrect25% 0.875x0.2 smd: 1(-3.437,2.6) 2(-3.437,2.2) 3(-3.437,1.8) 4(-3.437,1.4) 5(-3.437,1) 6(-3.437,0.6) 7(-3.437,0.2) 8(-3.437,-0.2) 9(-3.437,-0.6) 10(-3.437,-1) 11(-3.437,-1.4) 12(-3.437,-1.8) 13(-3.437,-2.2) 14(-3.437,-2.6) 29(3.437,-2.6) 30(3.437,-2.2) 31(3.437,-1.8) 32(3.437,-1.4) 33(3.437,-1) 34(3.437,-0.6) 35(3.437,-0.2) 36(3.437,0.2) 37(3.437,0.6) 38(3.437,1) 39(3.437,1.4) 40(3.437,1.8) 41(3.437,2.2) 42(3.437,2.6)
  rrect25% 0.2x0.875 smd: 15(-2.6,-3.437) 16(-2.2,-3.437) 17(-1.8,-3.437) 18(-1.4,-3.437) 19(-1,-3.437) 20(-0.6,-3.437) 21(-0.2,-3.437) 22(0.2,-3.437) 23(0.6,-3.437) 24(1,-3.437) 25(1.4,-3.437) 26(1.8,-3.437) 27(2.2,-3.437) 28(2.6,-3.437) 43(2.6,3.437) 44(2.2,3.437) 45(1.8,3.437) 46(1.4,3.437) 47(1,3.437) 48(0.6,3.437) 49(0.2,3.437) 50(-0.2,3.437) 51(-0.6,3.437) 52(-1,3.437) 53(-1.4,3.437) 54(-1.8,3.437) 55(-2.2,3.437) 56(-2.6,3.437)
  round 0.5 hole 0.2: 57(-2.55,-2.55) 57(-2.55,-1.275) 57(-2.55,0) 57(-2.55,1.275) 57(-2.55,2.55) 57(-1.275,-2.55) 57(-1.275,-1.275) 57(-1.275,0) 57(-1.275,1.275) 57(-1.275,2.55) 57(0,-2.55) 57(0,-1.275) 57(0,0) 57(0,1.275) 57(0,2.55) 57(1.275,-2.55) 57(1.275,-1.275) 57(1.275,0) 57(1.275,1.275) 57(1.275,2.55) 57(2.55,-2.55) 57(2.55,-1.275) 57(2.55,0) 57(2.55,1.275) 57(2.55,2.55)
  rect 5.6x5.6 smd: 57(0,0)
  rect 5.6x5.6 smd far side: 57(0,0)
  rrect23% 1.08x1.08 on Top Paste: Un1(-2.1,2.1) Un2(-2.1,0.7) Un3(-2.1,-0.7) Un4(-2.1,-2.1) Un5(-0.7,2.1) Un6(-0.7,0.7) Un7(-0.7,-0.7) Un8(-0.7,-2.1) Un9(0.7,2.1) Un10(0.7,0.7) Un11(0.7,-0.7) Un12(0.7,-2.1) Un13(2.1,2.1) Un14(2.1,0.7) Un15(2.1,-0.7) Un16(2.1,-2.1)
F.SilkS:
  region: -3.61,3.61 -3.85,3.94 -3.37,3.94
  lines w0.254: -3.61,-2.96 -3.61,-3.61 -2.96,-3.61 ; -3.61,2.96 -3.61,3.37 ; -3.31,3.61 -2.96,3.61 ; 2.96,-3.61 3.61,-3.61 3.61,-2.96 ; 2.96,3.61 3.61,3.61 3.61,2.96
Top Component Center:
  lines w0.127: -0.127,0 0.127,0 -0.127,0 ; 0,-0.127 0,0.127 0,-0.127
Top Assembly:
  region: 3.5,-3.5 -3.5,-3.5 -3.5,2.5 -2.5,3.5 3.5,3.5
Top Courtyard:
  lines w0.254: -4.13,-2.95 -4.13,2.95 -3.75,2.95 -3.75,3.75 -2.95,3.75 -2.95,4.13 2.95,4.13 2.95,3.75 3.75,3.75 3.75,2.95 4.13,2.95 4.13,-2.95 3.75,-2.95 3.75,-3.75 2.95,-3.75 2.95,-4.13 -2.95,-4.13 -2.95,-3.75 -3.75,-3.75 -3.75,-2.95 -4.13,-2.95
Top Designator:
  text ".Designator" at -3.43,-0.344 h1.52
3D body "QFN-56-1EP_7x7mm_P0.4mm_EP5.6x5.6mm.step": height 0.92, standoff 0, extent -3.5,-3.5 3.5,3.5

## QFN-56-1EP_8x8mm_P0.5mm_EP4.3x4.3mm [mm] "QFN-56-1EP_8x8mm_P0.5mm_EP4.3x4.3mm"
pads (73):
  rrect25% 0.875x0.25 smd: 1(-3.938,3.25) 2(-3.938,2.75) 3(-3.938,2.25) 4(-3.938,1.75) 5(-3.938,1.25) 6(-3.938,0.75) 7(-3.938,0.25) 8(-3.938,-0.25) 9(-3.938,-0.75) 10(-3.938,-1.25) 11(-3.938,-1.75) 12(-3.938,-2.25) 13(-3.938,-2.75) 14(-3.938,-3.25) 29(3.938,-3.25) 30(3.938,-2.75) 31(3.938,-2.25) 32(3.938,-1.75) 33(3.938,-1.25) 34(3.938,-0.75) 35(3.938,-0.25) 36(3.938,0.25) 37(3.938,0.75) 38(3.938,1.25) 39(3.938,1.75) 40(3.938,2.25) 41(3.938,2.75) 42(3.938,3.25)
  rrect25% 0.25x0.875 smd: 15(-3.25,-3.938) 16(-2.75,-3.938) 17(-2.25,-3.938) 18(-1.75,-3.938) 19(-1.25,-3.938) 20(-0.75,-3.938) 21(-0.25,-3.938) 22(0.25,-3.938) 23(0.75,-3.938) 24(1.25,-3.938) 25(1.75,-3.938) 26(2.25,-3.938) 27(2.75,-3.938) 28(3.25,-3.938) 43(3.25,3.938) 44(2.75,3.938) 45(2.25,3.938) 46(1.75,3.938) 47(1.25,3.938) 48(0.75,3.938) 49(0.25,3.938) 50(-0.25,3.938) 51(-0.75,3.938) 52(-1.25,3.938) 53(-1.75,3.938) 54(-2.25,3.938) 55(-2.75,3.938) 56(-3.25,3.938)
  rect 4.3x4.3 smd: 57(0,0)
  rrect25% 0.87x0.87 on Top Paste: Un1(-1.62,1.62) Un2(-1.62,0.54) Un3(-1.62,-0.54) Un4(-1.62,-1.62) Un5(-0.54,1.62) Un6(-0.54,0.54) Un7(-0.54,-0.54) Un8(-0.54,-1.62) Un9(0.54,1.62) Un10(0.54,0.54) Un11(0.54,-0.54) Un12(0.54,-1.62) Un13(1.62,1.62) Un14(1.62,0.54) Un15(1.62,-0.54) Un16(1.62,-1.62)
F.SilkS:
  region: -4.11,4.11 -4.35,4.44 -3.87,4.44
  lines w0.254: -4.11,-3.635 -4.11,-4.11 -3.635,-4.11 ; -4.11,3.635 -4.11,3.87 ; -3.81,4.11 -3.635,4.11 ; 3.635,-4.11 4.11,-4.11 4.11,-3.635 ; 3.635,4.11 4.11,4.11 4.11,3.635
Top Component Center:
  lines w0.127: -0.127,0 0.127,0 -0.127,0 ; 0,-0.127 0,0.127 0,-0.127
Top Assembly:
  region: 4,-4 -4,-4 -4,3 -3,4 4,4
Top Courtyard:
  lines w0.254: -4.63,-3.63 -4.63,3.63 -4.25,3.63 -4.25,4.25 -3.63,4.25 -3.63,4.63 3.63,4.63 3.63,4.25 4.25,4.25 4.25,3.63 4.63,3.63 4.63,-3.63 4.25,-3.63 4.25,-4.25 3.63,-4.25 3.63,-4.63 -3.63,-4.63 -3.63,-4.25 -4.25,-4.25 -4.25,-3.63 -4.63,-3.63
Top Designator:
  text ".Designator" at -3.43,-0.344 h1.52
3D body "QFN-56-1EP_8x8mm_P0.5mm_EP4.5x5.2mm.step": height 1, standoff 0, extent -4,-4 4,4

## QFN-56-1EP_8x8mm_P0.5mm_EP4.3x4.3mm_ThermalVias [mm] "QFN-56-1EP_8x8mm_P0.5mm_EP4.3x4.3mm_ThermalVias"
pads (99):
  rrect25% 0.875x0.25 smd: 1(-3.938,3.25) 2(-3.938,2.75) 3(-3.938,2.25) 4(-3.938,1.75) 5(-3.938,1.25) 6(-3.938,0.75) 7(-3.938,0.25) 8(-3.938,-0.25) 9(-3.938,-0.75) 10(-3.938,-1.25) 11(-3.938,-1.75) 12(-3.938,-2.25) 13(-3.938,-2.75) 14(-3.938,-3.25) 29(3.938,-3.25) 30(3.938,-2.75) 31(3.938,-2.25) 32(3.938,-1.75) 33(3.938,-1.25) 34(3.938,-0.75) 35(3.938,-0.25) 36(3.938,0.25) 37(3.938,0.75) 38(3.938,1.25) 39(3.938,1.75) 40(3.938,2.25) 41(3.938,2.75) 42(3.938,3.25)
  rrect25% 0.25x0.875 smd: 15(-3.25,-3.938) 16(-2.75,-3.938) 17(-2.25,-3.938) 18(-1.75,-3.938) 19(-1.25,-3.938) 20(-0.75,-3.938) 21(-0.25,-3.938) 22(0.25,-3.938) 23(0.75,-3.938) 24(1.25,-3.938) 25(1.75,-3.938) 26(2.25,-3.938) 27(2.75,-3.938) 28(3.25,-3.938) 43(3.25,3.938) 44(2.75,3.938) 45(2.25,3.938) 46(1.75,3.938) 47(1.25,3.938) 48(0.75,3.938) 49(0.25,3.938) 50(-0.25,3.938) 51(-0.75,3.938) 52(-1.25,3.938) 53(-1.75,3.938) 54(-2.25,3.938) 55(-2.75,3.938) 56(-3.25,3.938)
  round 0.5 hole 0.2: 57(-1.9,-1.9) 57(-1.9,-0.95) 57(-1.9,0) 57(-1.9,0.95) 57(-1.9,1.9) 57(-0.95,-1.9) 57(-0.95,-0.95) 57(-0.95,0) 57(-0.95,0.95) 57(-0.95,1.9) 57(0,-1.9) 57(0,-0.95) 57(0,0) 57(0,0.95) 57(0,1.9) 57(0.95,-1.9) 57(0.95,-0.95) 57(0.95,0) 57(0.95,0.95) 57(0.95,1.9) 57(1.9,-1.9) 57(1.9,-0.95) 57(1.9,0) 57(1.9,0.95) 57(1.9,1.9)
  rect 4.3x4.3 smd: 57(0,0)
  rect 4.3x4.3 smd far side: 57(0,0)
  rrect25% 0.83x0.83 on Top Paste: Un1(-1.62,1.62) Un2(-1.62,0.54) Un3(-1.62,-0.54) Un4(-1.62,-1.62) Un5(-0.54,1.62) Un6(-0.54,0.54) Un7(-0.54,-0.54) Un8(-0.54,-1.62) Un9(0.54,1.62) Un10(0.54,0.54) Un11(0.54,-0.54) Un12(0.54,-1.62) Un13(1.62,1.62) Un14(1.62,0.54) Un15(1.62,-0.54) Un16(1.62,-1.62)
F.SilkS:
  region: -4.11,4.11 -4.35,4.44 -3.87,4.44
  lines w0.254: -4.11,-3.635 -4.11,-4.11 -3.635,-4.11 ; -4.11,3.635 -4.11,3.87 ; -3.81,4.11 -3.635,4.11 ; 3.635,-4.11 4.11,-4.11 4.11,-3.635 ; 3.635,4.11 4.11,4.11 4.11,3.635
Top Component Center:
  lines w0.127: -0.127,0 0.127,0 -0.127,0 ; 0,-0.127 0,0.127 0,-0.127
Top Assembly:
  region: 4,-4 -4,-4 -4,3 -3,4 4,4
Top Courtyard:
  lines w0.254: -4.63,-3.63 -4.25,-3.63 -4.25,-4.25 -3.63,-4.25 -3.63,-4.63 3.63,-4.63 3.63,-4.25 4.25,-4.25 4.25,-3.63 4.63,-3.63 4.63,3.63 4.25,3.63 4.25,4.25 3.63,4.25 3.63,4.63 -3.63,4.63 -3.63,4.25 -4.25,4.25 -4.25,3.63 -4.63,3.63 -4.63,-3.63
Top Designator:
  text ".Designator" at -3.43,-0.344 h1.52
3D body "QFN-56-1EP_8x8mm_P0.5mm_EP4.5x5.2mm.step": height 1, standoff 0, extent -4,-4 4,4

## QFN-56-1EP_8x8mm_P0.5mm_EP4.5x5.2mm [mm] "QFN-56-1EP_8x8mm_P0.5mm_EP4.5x5.2mm"
pads (73):
  rrect25% 0.875x0.25 smd: 1(-3.938,3.25) 2(-3.938,2.75) 3(-3.938,2.25) 4(-3.938,1.75) 5(-3.938,1.25) 6(-3.938,0.75) 7(-3.938,0.25) 8(-3.938,-0.25) 9(-3.938,-0.75) 10(-3.938,-1.25) 11(-3.938,-1.75) 12(-3.938,-2.25) 13(-3.938,-2.75) 14(-3.938,-3.25) 29(3.938,-3.25) 30(3.938,-2.75) 31(3.938,-2.25) 32(3.938,-1.75) 33(3.938,-1.25) 34(3.938,-0.75) 35(3.938,-0.25) 36(3.938,0.25) 37(3.938,0.75) 38(3.938,1.25) 39(3.938,1.75) 40(3.938,2.25) 41(3.938,2.75) 42(3.938,3.25)
  rrect25% 0.25x0.875 smd: 15(-3.25,-3.938) 16(-2.75,-3.938) 17(-2.25,-3.938) 18(-1.75,-3.938) 19(-1.25,-3.938) 20(-0.75,-3.938) 21(-0.25,-3.938) 22(0.25,-3.938) 23(0.75,-3.938) 24(1.25,-3.938) 25(1.75,-3.938) 26(2.25,-3.938) 27(2.75,-3.938) 28(3.25,-3.938) 43(3.25,3.938) 44(2.75,3.938) 45(2.25,3.938) 46(1.75,3.938) 47(1.25,3.938) 48(0.75,3.938) 49(0.25,3.938) 50(-0.25,3.938) 51(-0.75,3.938) 52(-1.25,3.938) 53(-1.75,3.938) 54(-2.25,3.938) 55(-2.75,3.938) 56(-3.25,3.938)
  rect 4.5x5.2 smd: 57(0,0)
  rrect25% 0.91x1.05 on Top Paste: Un1(-1.68,1.95) Un2(-1.68,0.65) Un3(-1.68,-0.65) Un4(-1.68,-1.95) Un5(-0.56,1.95) Un6(-0.56,0.65) Un7(-0.56,-0.65) Un8(-0.56,-1.95) Un9(0.56,1.95) Un10(0.56,0.65) Un11(0.56,-0.65) Un12(0.56,-1.95) Un13(1.68,1.95) Un14(1.68,0.65) Un15(1.68,-0.65) Un16(1.68,-1.95)
F.SilkS:
  region: -4.11,4.11 -4.35,4.44 -3.87,4.44
  lines w0.254: -4.11,-3.635 -4.11,-4.11 -3.635,-4.11 ; -4.11,3.635 -4.11,3.87 ; -3.81,4.11 -3.635,4.11 ; 3.635,-4.11 4.11,-4.11 4.11,-3.635 ; 3.635,4.11 4.11,4.11 4.11,3.635
Top Component Center:
  lines w0.127: -0.127,0 0.127,0 -0.127,0 ; 0,-0.127 0,0.127 0,-0.127
Top Assembly:
  region: 4,-4 -4,-4 -4,3 -3,4 4,4
Top Courtyard:
  lines w0.254: -4.63,-3.63 -4.63,3.63 -4.25,3.63 -4.25,4.25 -3.63,4.25 -3.63,4.63 3.63,4.63 3.63,4.25 4.25,4.25 4.25,3.63 4.63,3.63 4.63,-3.63 4.25,-3.63 4.25,-4.25 3.63,-4.25 3.63,-4.63 -3.63,-4.63 -3.63,-4.25 -4.25,-4.25 -4.25,-3.63 -4.63,-3.63
Top Designator:
  text ".Designator" at -3.43,-0.344 h1.52
3D body "QFN-56-1EP_8x8mm_P0.5mm_EP4.5x5.2mm.step": height 1, standoff 0, extent -4,-4 4,4

## QFN-56-1EP_8x8mm_P0.5mm_EP4.5x5.2mm_ThermalVias [mm] "QFN-56-1EP_8x8mm_P0.5mm_EP4.5x5.2mm_ThermalVias"
pads (99):
  rrect25% 0.875x0.25 smd: 1(-3.938,3.25) 2(-3.938,2.75) 3(-3.938,2.25) 4(-3.938,1.75) 5(-3.938,1.25) 6(-3.938,0.75) 7(-3.938,0.25) 8(-3.938,-0.25) 9(-3.938,-0.75) 10(-3.938,-1.25) 11(-3.938,-1.75) 12(-3.938,-2.25) 13(-3.938,-2.75) 14(-3.938,-3.25) 29(3.938,-3.25) 30(3.938,-2.75) 31(3.938,-2.25) 32(3.938,-1.75) 33(3.938,-1.25) 34(3.938,-0.75) 35(3.938,-0.25) 36(3.938,0.25) 37(3.938,0.75) 38(3.938,1.25) 39(3.938,1.75) 40(3.938,2.25) 41(3.938,2.75) 42(3.938,3.25)
  rrect25% 0.25x0.875 smd: 15(-3.25,-3.938) 16(-2.75,-3.938) 17(-2.25,-3.938) 18(-1.75,-3.938) 19(-1.25,-3.938) 20(-0.75,-3.938) 21(-0.25,-3.938) 22(0.25,-3.938) 23(0.75,-3.938) 24(1.25,-3.938) 25(1.75,-3.938) 26(2.25,-3.938) 27(2.75,-3.938) 28(3.25,-3.938) 43(3.25,3.938) 44(2.75,3.938) 45(2.25,3.938) 46(1.75,3.938) 47(1.25,3.938) 48(0.75,3.938) 49(0.25,3.938) 50(-0.25,3.938) 51(-0.75,3.938) 52(-1.25,3.938) 53(-1.75,3.938) 54(-2.25,3.938) 55(-2.75,3.938) 56(-3.25,3.938)
  round 0.5 hole 0.2: 57(-2,-2.35) 57(-2,-1.175) 57(-2,0) 57(-2,1.175) 57(-2,2.35) 57(-1,-2.35) 57(-1,-1.175) 57(-1,0) 57(-1,1.175) 57(-1,2.35) 57(0,-2.35) 57(0,-1.175) 57(0,0) 57(0,1.175) 57(0,2.35) 57(1,-2.35) 57(1,-1.175) 57(1,0) 57(1,1.175) 57(1,2.35) 57(2,-2.35) 57(2,-1.175) 57(2,0) 57(2,1.175) 57(2,2.35)
  rect 4.5x5.2 smd: 57(0,0)
  rect 4.5x5.2 smd far side: 57(0,0)
  rrect25% 0.87x1.01 on Top Paste: Un1(-1.68,1.95) Un2(-1.68,0.65) Un3(-1.68,-0.65) Un4(-1.68,-1.95) Un5(-0.56,1.95) Un6(-0.56,0.65) Un7(-0.56,-0.65) Un8(-0.56,-1.95) Un9(0.56,1.95) Un10(0.56,0.65) Un11(0.56,-0.65) Un12(0.56,-1.95) Un13(1.68,1.95) Un14(1.68,0.65) Un15(1.68,-0.65) Un16(1.68,-1.95)
F.SilkS:
  region: -4.11,4.11 -4.35,4.44 -3.87,4.44
  lines w0.254: -4.11,-3.635 -4.11,-4.11 -3.635,-4.11 ; -4.11,3.635 -4.11,3.87 ; -3.81,4.11 -3.635,4.11 ; 3.635,-4.11 4.11,-4.11 4.11,-3.635 ; 3.635,4.11 4.11,4.11 4.11,3.635
Top Component Center:
  lines w0.127: -0.127,0 0.127,0 -0.127,0 ; 0,-0.127 0,0.127 0,-0.127
Top Assembly:
  region: 4,-4 -4,-4 -4,3 -3,4 4,4
Top Courtyard:
  lines w0.254: -4.63,-3.63 -4.25,-3.63 -4.25,-4.25 -3.63,-4.25 -3.63,-4.63 3.63,-4.63 3.63,-4.25 4.25,-4.25 4.25,-3.63 4.63,-3.63 4.63,3.63 4.25,3.63 4.25,4.25 3.63,4.25 3.63,4.63 -3.63,4.63 -3.63,4.25 -4.25,4.25 -4.25,3.63 -4.63,3.63 -4.63,-3.63
Top Designator:
  text ".Designator" at -3.43,-0.344 h1.52
3D body "QFN-56-1EP_8x8mm_P0.5mm_EP4.5x5.2mm.step": height 1, standoff 0, extent -4,-4 4,4

## QFN-56-1EP_8x8mm_P0.5mm_EP4.5x5.2mm_ThermalVias_TopTented [mm] "QFN-56-1EP_8x8mm_P0.5mm_EP4.5x5.2mm_ThermalVias_TopTented"
pads (115):
  rrect25% 0.875x0.25 smd: 1(-3.938,3.25) 2(-3.938,2.75) 3(-3.938,2.25) 4(-3.938,1.75) 5(-3.938,1.25) 6(-3.938,0.75) 7(-3.938,0.25) 8(-3.938,-0.25) 9(-3.938,-0.75) 10(-3.938,-1.25) 11(-3.938,-1.75) 12(-3.938,-2.25) 13(-3.938,-2.75) 14(-3.938,-3.25) 29(3.938,-3.25) 30(3.938,-2.75) 31(3.938,-2.25) 32(3.938,-1.75) 33(3.938,-1.25) 34(3.938,-0.75) 35(3.938,-0.25) 36(3.938,0.25) 37(3.938,0.75) 38(3.938,1.25) 39(3.938,1.75) 40(3.938,2.25) 41(3.938,2.75) 42(3.938,3.25)
  rrect25% 0.25x0.875 smd: 15(-3.25,-3.938) 16(-2.75,-3.938) 17(-2.25,-3.938) 18(-1.75,-3.938) 19(-1.25,-3.938) 20(-0.75,-3.938) 21(-0.25,-3.938) 22(0.25,-3.938) 23(0.75,-3.938) 24(1.25,-3.938) 25(1.75,-3.938) 26(2.25,-3.938) 27(2.75,-3.938) 28(3.25,-3.938) 43(3.25,3.938) 44(2.75,3.938) 45(2.25,3.938) 46(1.75,3.938) 47(1.25,3.938) 48(0.75,3.938) 49(0.25,3.938) 50(-0.25,3.938) 51(-0.75,3.938) 52(-1.25,3.938) 53(-1.75,3.938) 54(-2.25,3.938) 55(-2.75,3.938) 56(-3.25,3.938)
  round 0.5 hole 0.2: 57(-2,-2.35) 57(-2,-1.175) 57(-2,0) 57(-2,1.175) 57(-2,2.35) 57(-1,-2.35) 57(-1,-1.175) 57(-1,0) 57(-1,1.175) 57(-1,2.35) 57(0,-2.35) 57(0,-1.175) 57(0,0) 57(0,1.175) 57(0,2.35) 57(1,-2.35) 57(1,-1.175) 57(1,0) 57(1,1.175) 57(1,2.35) 57(2,-2.35) 57(2,-1.175) 57(2,0) 57(2,1.175) 57(2,2.35)
  rrect6% 4.5x5.2 smd: 57(0,0)
  rrect6% 4.5x5.2 smd far side: 57(0,0)
  round 0.776 on Top Solder: Un1(-1.5,1.763) Un3(-1.5,0.587) Un5(-1.5,-0.587) Un7(-1.5,-1.763) Un9(-0.5,1.763) Un11(-0.5,0.587) Un13(-0.5,-0.587) Un15(-0.5,-1.763) Un17(0.5,1.763) Un19(0.5,0.587) Un21(0.5,-0.587) Un23(0.5,-1.763) Un25(1.5,1.763) Un27(1.5,0.587) Un29(1.5,-0.587) Un31(1.5,-1.763)
  round 0.776 on Top Paste: Un2(-1.5,1.763) Un4(-1.5,0.587) Un6(-1.5,-0.587) Un8(-1.5,-1.763) Un10(-0.5,1.763) Un12(-0.5,0.587) Un14(-0.5,-0.587) Un16(-0.5,-1.763) Un18(0.5,1.763) Un20(0.5,0.587) Un22(0.5,-0.587) Un24(0.5,-1.763) Un26(1.5,1.763) Un28(1.5,0.587) Un30(1.5,-0.587) Un32(1.5,-1.763)
F.SilkS:
  region: -4.11,4.11 -4.35,4.44 -3.87,4.44
  lines w0.254: -4.11,-3.635 -4.11,-4.11 -3.635,-4.11 ; -4.11,3.635 -4.11,3.87 ; -3.81,4.11 -3.635,4.11 ; 3.635,-4.11 4.11,-4.11 4.11,-3.635 ; 3.635,4.11 4.11,4.11 4.11,3.635
F.Paste:
  region: -1.065,2.12 -1.065,1.405 -1.21,1.26 -1.79,1.26 -1.935,1.405 -1.935,2.12 -1.79,2.265 -1.21,2.265
  region: -1.065,0.945 -1.065,0.23 -1.21,0.085 -1.79,0.085 -1.935,0.23 -1.935,0.945 -1.79,1.09 -1.21,1.09
  region: -1.065,-0.23 -1.065,-0.945 -1.21,-1.09 -1.79,-1.09 -1.935,-0.945 -1.935,-0.23 -1.79,-0.085 -1.21,-0.085
  region: -1.065,-1.405 -1.065,-2.12 -1.21,-2.265 -1.79,-2.265 -1.935,-2.12 -1.935,-1.405 -1.79,-1.26 -1.21,-1.26
  region: -0.065,2.12 -0.065,1.405 -0.21,1.26 -0.79,1.26 -0.935,1.405 -0.935,2.12 -0.79,2.265 -0.21,2.265
  region: -0.065,0.945 -0.065,0.23 -0.21,0.085 -0.79,0.085 -0.935,0.23 -0.935,0.945 -0.79,1.09 -0.21,1.09
  region: -0.065,-0.23 -0.065,-0.945 -0.21,-1.09 -0.79,-1.09 -0.935,-0.945 -0.935,-0.23 -0.79,-0.085 -0.21,-0.085
  region: -0.065,-1.405 -0.065,-2.12 -0.21,-2.265 -0.79,-2.265 -0.935,-2.12 -0.935,-1.405 -0.79,-1.26 -0.21,-1.26
  region: 0.935,2.12 0.935,1.405 0.79,1.26 0.21,1.26 0.065,1.405 0.065,2.12 0.21,2.265 0.79,2.265
  region: 0.935,0.945 0.935,0.23 0.79,0.085 0.21,0.085 0.065,0.23 0.065,0.945 0.21,1.09 0.79,1.09
  region: 0.935,-0.23 0.935,-0.945 0.79,-1.09 0.21,-1.09 0.065,-0.945 0.065,-0.23 0.21,-0.085 0.79,-0.085
  region: 0.935,-1.405 0.935,-2.12 0.79,-2.265 0.21,-2.265 0.065,-2.12 0.065,-1.405 0.21,-1.26 0.79,-1.26
  region: 1.935,2.12 1.935,1.405 1.79,1.26 1.21,1.26 1.065,1.405 1.065,2.12 1.21,2.265 1.79,2.265
  region: 1.935,0.945 1.935,0.23 1.79,0.085 1.21,0.085 1.065,0.23 1.065,0.945 1.21,1.09 1.79,1.09
  region: 1.935,-0.23 1.935,-0.945 1.79,-1.09 1.21,-1.09 1.065,-0.945 1.065,-0.23 1.21,-0.085 1.79,-0.085
  region: 1.935,-1.405 1.935,-2.12 1.79,-2.265 1.21,-2.265 1.065,-2.12 1.065,-1.405 1.21,-1.26 1.79,-1.26
F.Mask:
  drawing of 80 lines, arcs and shapes, not listed
Top Component Center:
  lines w0.127: -0.127,0 0.127,0 -0.127,0 ; 0,-0.127 0,0.127 0,-0.127
Top Assembly:
  lines w0.254: -4,-4 -4,3 -3,4 4,4 4,-4 -4,-4
Top Courtyard:
  lines w0.254: -4.62,-4.62 -4.62,4.62 4.62,4.62 4.62,-4.62 -4.62,-4.62
Top Designator:
  text ".Designator" at -3.43,-0.344 h1.52
3D body "QFN-56-1EP_8x8mm_P0.5mm_EP4.5x5.2mm.step": height 1, standoff 0, extent -4,-4 4,4